# Altium footprint library Flst_PcbLib.PcbLib: 23 footprints (part 2 of 2)
Each footprint in its own frame and in the unit in brackets; x right, y up, seen from the top. Pads: shape width x height; smd on the part's side, far side on the other; paste and mask are expansions set on the pad; w line width, h text height; cw(c..) or ccw(c..) is an arc to the next point about the centre after c.
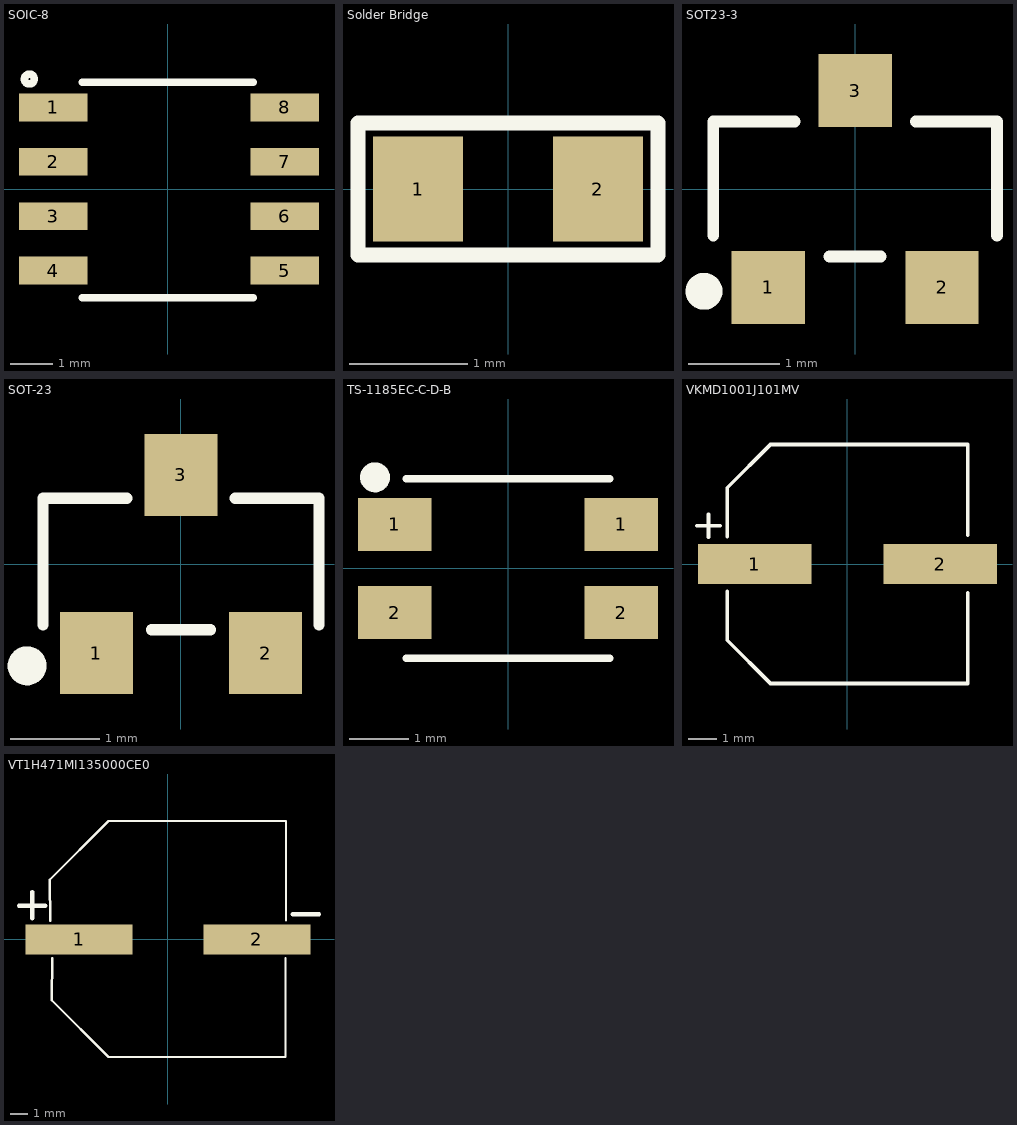
[diagram p1: the footprints below, top view; thin cyan lines are the x and y axes]

## SOIC-8 [mm]
height 1.778
pads (8):
  rect 1.6x0.65 smd: 1(-2.667,1.905) 2(-2.667,0.635) 3(-2.667,-0.635) 4(-2.667,-1.905) 5(2.733,-1.905) 6(2.733,-0.635) 7(2.733,0.635) 8(2.733,1.905)
Top Overlay:
  circle w0.178: c-3.226,2.565 r0.114
  lines w0.178: -1.994,-2.54 1.994,-2.54 ; -1.994,2.489 1.994,2.489
3D body "SO-8N.STEP": height 1.61, standoff -0.01, extent -3,-2.46 3,2.46

## Solder Bridge [mil] "Solder Bridge ON"
pads (2):
  rect 30x35 smd: 1(-30,0) 2(30,0)
Top Overlay:
  lines w5: -50,-22 -50,22 50,22 50,-22 -50,-22

## SOT23-3 [mm] "SOT23, 3-Leads, Body 2.9x1.3mm, Pitch 0.95mm, Lead Span 2.3mm - Reverse Pinning, IPC High Density"
height 1.1
pads (3):
  rect 0.8x0.8 smd: 1(-0.95,-1.075) 2(0.95,-1.075) 3(0,1.075)
Top Overlay:
  circle w0.25: c-1.651,-1.118 r0.076
  lines w0.127: -1.55,-0.508 -1.55,0.737 -0.661,0.737 ; -0.28,-0.737 0.279,-0.737 ; 0.66,0.737 1.549,0.737 1.549,-0.508
3D body "CircuitWorks-SOT-23.step": height 1.05, standoff -0.05, extent -1.5,-1.25 1.5,1.25

## SOT-23 [mm] "TRANS NPN 40V 0.6A SOT23"
pads (3):
  rect 0.82x0.92 smd: 1(-0.95,-1) 2(0.95,-1) 3(0,1)
Top Overlay:
  circle w0.254: c-1.727,-1.143 r0.092
  lines w0.127: -1.549,-0.686 -1.549,0.737 -0.61,0.737 ; -0.33,-0.737 0.33,-0.737 ; 0.61,0.737 1.549,0.737 1.549,-0.686
3D body "CircuitWorks-SOT-23.step": height 1.1, standoff 0, extent -1.5,-1.25 1.5,1.25

## TS-1185EC-C-D-B [mm]
pads (4):
  rect 1.25x0.9 smd: 1(-1.925,0.75) 1(1.925,0.75) 2(-1.925,-0.75) 2(1.925,-0.75)
Top Overlay:
  circle w0.254: c-2.261,1.549 r0.127
  lines w0.127: -1.727,-1.524 1.727,-1.524 ; -1.727,1.524 1.727,1.524
3D body "ts-1185ec-c-d-b.stp": height 2, standoff 0, extent -2.325,-1.5 2.325,1.5

## VKMD1001J101MV [mm] "63V 10mm 8mm 100uF ±20%"
pads (2):
  rect 4x1.4 smd: 1(-3.275,0) 2(3.275,0)
Top Overlay:
  lines w0.127: -5.309,1.346 -4.496,1.346 ; -4.902,0.94 -4.902,1.753 ; -4.242,-0.965 -4.242,-2.692 -2.718,-4.216 4.242,-4.216 4.242,-1.016 ; -4.242,0.965 -4.242,2.692 -2.718,4.216 4.242,4.216 4.242,1.016
3D body "vkmd1001j101mv_c487384.stp": height 9.95, standoff -0.05, extent -4.65,-4.15 4.65,4.15

## VT1H471MI135000CE0 [mm] "470uF ±20% 50V 12.5mm 13.5mm 1000hrs 105? -40?~+105? SMD,12.5x13.5mm Aluminum Electrolytic Capacitors - SMD RoHS"
pads (2):
  rect 6.2x1.75 smd: 1(-5.145,0) 2(5.145,0)
Top Overlay:
  lines w0.127: -6.818,1.067 -6.848,3.459 -3.449,6.858 6.833,6.858 6.833,1.092 ; -6.697,-1.092 -6.728,-3.528 -3.449,-6.807 6.797,-6.807 6.797,-1.067
  lines w0.254: -8.625,1.956 -7.101,1.956 ; -7.863,1.219 -7.863,2.743 ; 7.219,1.448 8.743,1.448
3D body "EEVTG1V471UQ.stp": height 14, standoff 0, extent -7.5,-6.85 7.5,6.85